# Altium schematic symbol library WP934MD-LILGD.SchLib: 1 symbol
Pins are listed as number, name and electrical type; pins without a type are passive.

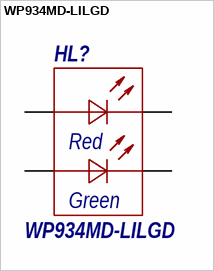
[diagram p0: symbol WP934MD-LILGD]

## WP934MD-LILGD
designator HL?
pins: 1, 2, 3, 4
text: Red; Green